# Altium footprint library RELAY_PR27-5V-S-900-1A-EF.PcbLib: 1 footprints
Each footprint in its own frame and in the unit in brackets; x right, y up, seen from the top. Pads: shape width x height; smd on the part's side, far side on the other; paste and mask are expansions set on the pad; w line width, h text height; cw(c..) or ccw(c..) is an arc to the next point about the centre after c.
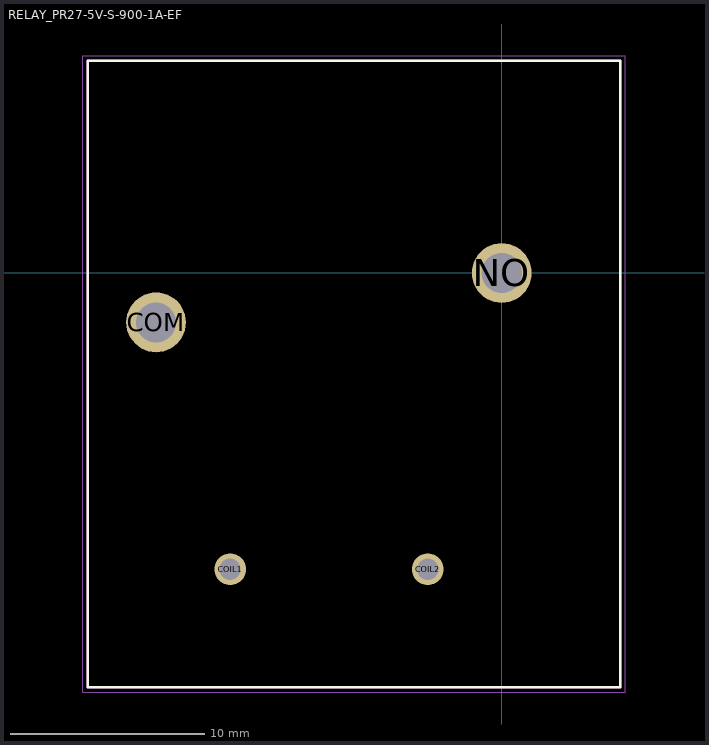
[diagram p0: the footprint, top view; thin cyan lines are the x and y axes]

## RELAY_PR27-5V-S-900-1A-EF [mm]
height 28.174
pads (4):
  round 1.635 hole 1.09: COIL1(-13.97,-15.24) COIL2(-3.81,-15.24)
  round 3.076 hole 2.06: COM(-17.78,-2.54) NO(0,0)
Top Overlay:
  lines w0.127: -21.3,-21.31 -21.3,10.92 6.1,10.92 6.1,-21.31 -21.3,-21.31
Mechanical 13:
  lines w0.127: -21.3,-21.31 -21.3,10.92 6.1,10.92 6.1,-21.31 -21.3,-21.31
Mechanical 15:
  lines w0.05: -21.55,-21.56 6.35,-21.56 6.35,11.17 -21.55,11.17 -21.55,-21.56